# EAGLE library part MBT3904DW1T1G (library madhu)
Dual NPN 150 mW, 300 MHz ft
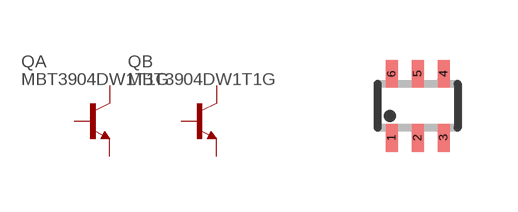
[diagram p13: symbol with the pads of SOT363; footprint SOT363]

Designator prefix Q; gates A=NPN B=NPN

## MBT3904DW1T1G-1  [SOT363]
1  B:E  pas
2  B:B  pas
3  A:C  pas
4  A:E  pas
5  A:B  pas
6  B:C  pas

## Footprint SOT363 (pad centres in mm)
Small Outline Transistor; 6 leads Reflow soldering INFINEON, www.infineon.com/cmc_upload/0/000/010/257/eh_db_5b.pdf
smd 0.3 x 0.7: 1 -0.65,-0.8; 2 0,-0.8; 3 0.65,-0.8; 4 0.65,0.8; 5 0,0.8; 6 -0.65,0.8